# EAGLE library part SuperMini_nRF52840 (library JR)
nRF52840 module, nice-nano v2 pinout, LiPo charger, USB-C. Pro Micro 24-pin
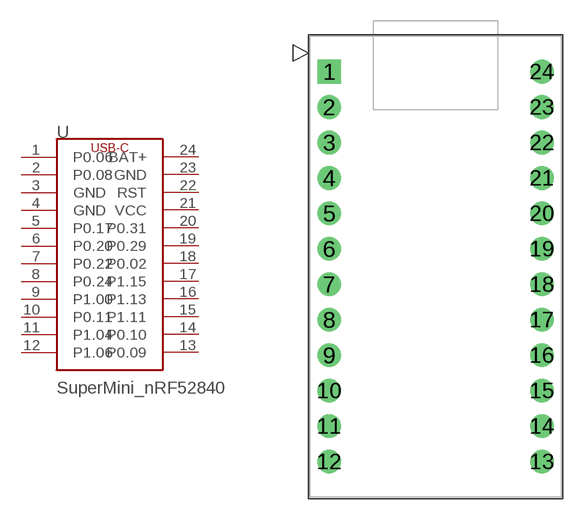
[diagram p0: symbol with the pads of SuperMini_nRF52840; footprint SuperMini_nRF52840]

Designator prefix U

## SuperMini_nRF52840 (DESCRIPTION: nRF52840 module, nice-nano v2 pinout, LiPo charger, USB-C. Pro Micro 24-pin; MANUFACTURER: generic nice-nano v2 clone; MPN: SuperMini nRF52840)  [SuperMini_nRF52840]
1  P0.06  pas
2  P0.08  pas
3  GND  pas
4  GND  pas
5  P0.17  pas
6  P0.20  pas
7  P0.22  pas
8  P0.24  pas
9  P1.00  pas
10  P0.11  pas
11  P1.04  pas
12  P1.06  pas
13  P0.09  pas
14  P0.10  pas
15  P1.11  pas
16  P1.13  pas
17  P1.15  pas
18  P0.02  pas
19  P0.29  pas
20  P0.31  pas
21  VCC  pas
22  RST  pas
23  GND  pas
24  BAT+  pas

## Footprint SuperMini_nRF52840 (pad centres in mm)
SuperMini nRF52840 / nice-nano v2, Pro Micro 24-pin, 2.54 mm, rows 15.24 mm. Module outline 18 x 33 mm, USB-C at the top edge
drill 1 pad 1.7 square: 1 -7.62,13.97
drill 1 pad 1.7 round: 2 -7.62,11.43; 3 -7.62,8.89; 4 -7.62,6.35; 5 -7.62,3.81; 6 -7.62,1.27; 7 -7.62,-1.27; 8 -7.62,-3.81; 9 -7.62,-6.35; 10 -7.62,-8.89; 11 -7.62,-11.43; 12 -7.62,-13.97; 13 7.62,-13.97; 14 7.62,-11.43; 15 7.62,-8.89; 16 7.62,-6.35; 17 7.62,-3.81; 18 7.62,-1.27; 19 7.62,1.27; 20 7.62,3.81; 21 7.62,6.35; 22 7.62,8.89; 23 7.62,11.43; 24 7.62,13.97